# Altium schematic symbol library 2020-02-23_13-35-01.SchLib: 2 symbols
Pins are listed as number, name and electrical type; pins without a type are passive.

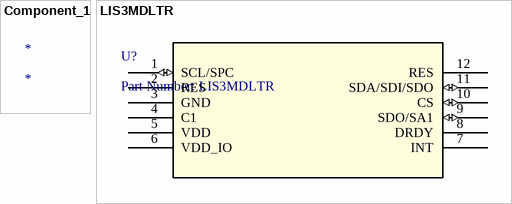
[diagram p0: symbols Component_1 to LIS3MDLTR]

## Component_1
designator *

## LIS3MDLTR
designator U?, comment Part Number: LIS3MDLTR
No Description Available; Vendor: STMicroelectronics; Built_By: EMA_Jessica; Manufacturer_Part_Number: LIS3MDLTR; Copyright: Copyright (C) 2018 Accelerated Designs. All rights reserved; RefDes: RefDes; Type: DEV; Value: Value
footprint LGA-12_2X2X1
pins: 1 SCL/SPC (io), 2 RES, 3 GND (power), 4 C1, 5 VDD (power), 6 VDD_IO (power), 7 INT, 8 DRDY, 9 SDO/SA1 (io), 10 CS (io), 11 SDA/SDI/SDO (io), 12 RES